# Altium footprint library TPS7A2501DRVR.PcbLib: 4 footprints
Each footprint in its own frame and in the unit in brackets; x right, y up, seen from the top. Pads: shape width x height; smd on the part's side, far side on the other; paste and mask are expansions set on the pad; w line width, h text height; cw(c..) or ccw(c..) is an arc to the next point about the centre after c.
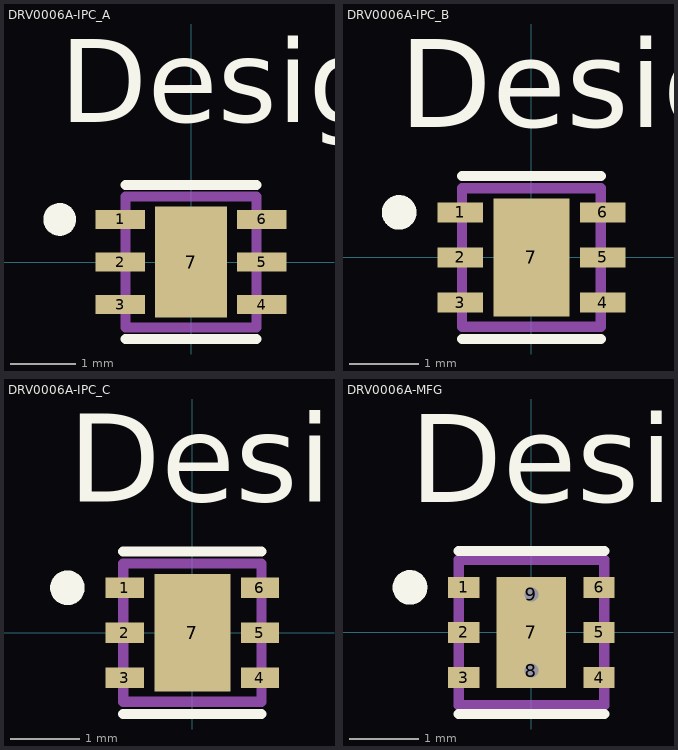
[diagram p0: the footprints below, top view; thin cyan lines are the x and y axes]

## DRV0006A-IPC_A [mm]
pads (7):
  rect 0.756x0.292 smd paste+0 mask+0: 1(-1.078,0.65) 2(-1.078,0) 3(-1.078,-0.65) 4(1.078,-0.65) 5(1.078,0) 6(1.078,0.65)
  rect 1.1x1.7 smd paste-0.837 mask+0: 7(0,0)
Top Overlay:
  circle w0.25: c-2.006,0.65 r0.125
  lines w0.15: -1,-1.175 1,-1.175 ; -1,1.175 1,1.175
  text "Designator76" at -2.007,2.134 h1.27
  text ".Designator" at -3.492,-0.635 h1.27
Top Paste:
  region: -0.308,0.608 -0.308,-0.608 0.308,-0.608 0.308,0.608
Mechanical 13:
  lines w0.15: -1,-1 -1,1 1,1 1,-1 -1,-1
  text ".Designator" at -3.492,-0.635 h1.27

## DRV0006A-IPC_B [mm]
pads (7):
  rect 0.656x0.292 smd paste+0 mask+0: 1(-1.028,0.65) 2(-1.028,0) 3(-1.028,-0.65) 4(1.028,-0.65) 5(1.028,0) 6(1.028,0.65)
  rect 1.1x1.7 smd paste-0.837 mask+0: 7(0,0)
Top Overlay:
  circle w0.25: c-1.906,0.65 r0.125
  lines w0.15: -1,-1.175 1,-1.175 ; -1,1.175 1,1.175
  text "Designator74" at -1.905,1.88 h1.27
  text ".Designator" at -3.492,-0.635 h1.27
Top Paste:
  region: -0.308,0.608 -0.308,-0.608 0.308,-0.608 0.308,0.608
Mechanical 13:
  lines w0.15: -1,-1 -1,1 1,1 1,-1 -1,-1
  text ".Designator" at -3.492,-0.635 h1.27

## DRV0006A-IPC_C [mm]
pads (7):
  rect 0.556x0.292 smd paste+0 mask+0: 1(-0.978,0.65) 2(-0.978,0) 3(-0.978,-0.65) 4(0.978,-0.65) 5(0.978,0) 6(0.978,0.65)
  rect 1.1x1.7 smd paste-0.837 mask+0: 7(0,0)
Top Overlay:
  circle w0.25: c-1.806,0.65 r0.125
  lines w0.15: -1,-1.175 1,-1.175 ; -1,1.175 1,1.175
  text "Designator73" at -1.796,1.892 h1.27
  text ".Designator" at -3.492,-0.635 h1.27
Top Paste:
  region: -0.308,0.608 -0.308,-0.608 0.308,-0.608 0.308,0.608
Mechanical 13:
  lines w0.15: -1,-1 -1,1 1,1 1,-1 -1,-1
  text ".Designator" at -3.492,-0.635 h1.27

## DRV0006A-MFG [mm]
pads (9):
  rect 0.45x0.3 smd paste+0 mask+0: 1(-0.975,0.65) 2(-0.975,0) 3(-0.975,-0.65) 4(0.975,-0.65) 5(0.975,0) 6(0.975,0.65)
  rect 1x1.6 smd paste-0.787 mask+0: 7(0,0)
  round 0.5 hole 0.203 paste-0.25 mask+0: 8(0,-0.55) 9(0,0.55)
Top Overlay:
  circle w0.25: c-1.75,0.65 r0.125
  lines w0.15: -1.05,-1.175 1.05,-1.175 ; -1.05,1.175 1.05,1.175
  text "Designator72" at -1.753,1.88 h1.27
  text ".Designator" at -3.492,-0.635 h1.27
Top Paste:
  region: -0.5,-0.75 -0.5,-0.15 -0.45,-0.1 0.45,-0.1 0.5,-0.15 0.5,-0.75 0.45,-0.8 -0.45,-0.8
  region: -0.45,0.8 0.45,0.8 0.5,0.75 0.5,0.15 0.45,0.1 -0.45,0.1 -0.5,0.15 -0.5,0.75
Mechanical 13:
  lines w0.15: -1.05,-1.05 -1.05,1.05 1.05,1.05 1.05,-1.05 -1.05,-1.05
  text ".Designator" at -3.492,-0.635 h1.27